# Altium footprint library SS34_DO-214AC.PcbLib: 3 footprints
Each footprint in its own frame and in the unit in brackets; x right, y up, seen from the top. Pads: shape width x height; smd on the part's side, far side on the other; paste and mask are expansions set on the pad; w line width, h text height; cw(c..) or ccw(c..) is an arc to the next point about the centre after c.
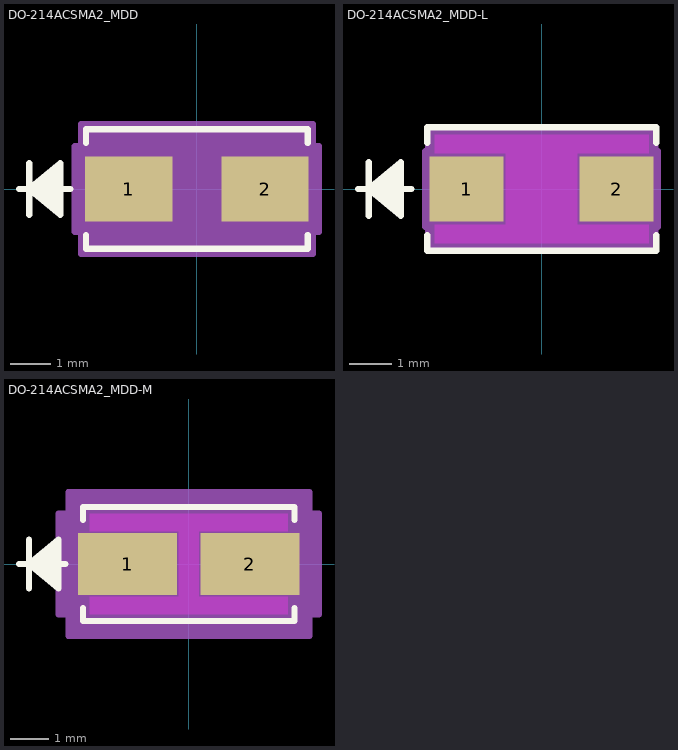
[diagram p0: the footprints below, top view; thin cyan lines are the x and y axes]

## DO-214ACSMA2_MDD [mil]
pads (2):
  rect 84.59x63 smd paste+0 mask+0: 1(-66.11,0) 2(66.11,0)
Top Overlay:
  lines w6: -172.5,0 -122.5,0 ; -162.5,-25 -162.5,25 ; -132.5,-20 -162.5,0 ; -132.5,-15 -162.5,0 ; -132.5,-10 -162.5,0 ; -132.5,-5 -162.5,0 ; -132.5,5 -162.5,0 ; -132.5,10 -162.5,0 ; -132.5,15 -162.5,0 ; -132.5,20 -162.5,0 ; -107.5,-44.6 -107.5,-58 107.5,-58 107.5,-44.6 ; -107.5,44.6 -107.5,58 107.5,58 107.5,44.6 ; -162.5,0 -132.5,25 -132.5,-25 -162.5,0
  text ".Designator" at -137.5,-25 h50
Mechanical 13:
  lines w1: -172.5,0 -122.5,0 ; -162.5,-25 -162.5,25 ; -132.5,-20 -162.5,0 ; -132.5,-15 -162.5,0 ; -132.5,-10 -162.5,0 ; -132.5,-5 -162.5,0 ; -132.5,5 -162.5,0 ; -132.5,10 -162.5,0 ; -132.5,15 -162.5,0 ; -132.5,20 -162.5,0 ; -162.5,0 -132.5,25 -132.5,-25 -162.5,0 ; -102.5,-53 102.5,-53 102.5,53 -102.5,53 -102.5,-53
  text ".Designator" at -137.5,-25 h50
Mechanical 15:
  region: -112.5,-41.5 -118.41,-41.5 -118.41,41.5 -112.5,41.5 -112.5,63 112.5,63 112.5,41.5 118.41,41.5 118.41,-41.5 112.5,-41.5 112.5,-63 -112.5,-63
  lines w6: -118.41,-41.5 -118.41,41.5 -112.5,41.5 -112.5,63 112.5,63 112.5,41.5 118.41,41.5 118.41,-41.5 112.5,-41.5 112.5,-63 -112.5,-63 -112.5,-41.5 -118.41,-41.5
3D body "DO-214ACSMA2_MDD.step": height 89.02, standoff 0, extent -102.52,-52.99 102.52,52.99

## DO-214ACSMA2_MDD-L [mil]
pads (2):
  rect 69.63x61.03 smd paste+0 mask+0: 1(-70.44,0) 2(70.44,0)
Top Layer keep-out:
  region: -33.63,-33.5 -33.63,33.5 33.63,33.5 33.63,-33.5
  region: -100.5,33.5 -100.5,51 100.5,51 100.5,33.5
  region: -100.5,-51 -100.5,-33.5 100.5,-33.5 100.5,-51
Top Overlay:
  lines w6: -172.5,0 -122.5,0 ; -162.5,-25 -162.5,25 ; -132.5,-20 -162.5,0 ; -132.5,-15 -162.5,0 ; -132.5,-10 -162.5,0 ; -132.5,-5 -162.5,0 ; -132.5,5 -162.5,0 ; -132.5,10 -162.5,0 ; -132.5,15 -162.5,0 ; -132.5,20 -162.5,0 ; -107.5,-43.42 -107.5,-58 107.5,-58 107.5,-43.42 ; -107.5,43.42 -107.5,58 107.5,58 107.5,43.42 ; -162.5,0 -132.5,25 -132.5,-25 -162.5,0
  text ".Designator" at -137.5,-25 h50
Keep-Out Layer:
  region: -33.63,-33.5 -33.63,33.5 33.63,33.5 33.63,-33.5
Mechanical 13:
  lines w1: -172.5,0 -122.5,0 ; -162.5,-25 -162.5,25 ; -132.5,-20 -162.5,0 ; -132.5,-15 -162.5,0 ; -132.5,-10 -162.5,0 ; -132.5,-5 -162.5,0 ; -132.5,5 -162.5,0 ; -132.5,10 -162.5,0 ; -132.5,15 -162.5,0 ; -132.5,20 -162.5,0 ; -162.5,0 -132.5,25 -132.5,-25 -162.5,0 ; -102.5,-53 102.5,-53 102.5,53 -102.5,53 -102.5,-53
  text ".Designator" at -137.5,-25 h50
Mechanical 15:
  region: -106.5,-35.5 -109.26,-35.5 -109.26,35.5 -106.5,35.5 -106.5,57 106.5,57 106.5,35.5 109.26,35.5 109.26,-35.5 106.5,-35.5 106.5,-57 -106.5,-57
  lines w6: -109.26,-35.5 -109.26,35.5 -106.5,35.5 -106.5,57 106.5,57 106.5,35.5 109.26,35.5 109.26,-35.5 106.5,-35.5 106.5,-57 -106.5,-57 -106.5,-35.5 -109.26,-35.5
3D body "DO-214ACSMA2_MDD.step": height 89.02, standoff 0, extent -102.52,-52.99 102.52,52.99

## DO-214ACSMA2_MDD-M [mil]
pads (2):
  rect 100.34x63 smd paste+0 mask+0: 1(-62.17,0) 2(62.17,0)
Top Layer keep-out:
  region: -10,-33.5 -10,33.5 10,33.5 10,-33.5
  region: -100.5,33.5 -100.5,51 100.5,51 100.5,33.5
  region: -100.5,-51 -100.5,-33.5 100.5,-33.5 100.5,-51
Top Overlay:
  lines w6: -172.5,0 -125.44,0 ; -162.5,-25 -162.5,25 ; -132.5,-20 -162.5,0 ; -132.5,-15 -162.5,0 ; -132.5,-10 -162.5,0 ; -132.5,-5 -162.5,0 ; -132.5,5 -162.5,0 ; -132.5,10 -162.5,0 ; -132.5,15 -162.5,0 ; -132.5,20 -162.5,0 ; -107.5,-44.6 -107.5,-58 107.5,-58 107.5,-44.6 ; -107.5,44.6 -107.5,58 107.5,58 107.5,44.6 ; -162.5,0 -132.5,25 -132.5,-25 -162.5,0
  text ".Designator" at -137.5,-25 h50
Keep-Out Layer:
  region: -10,-33.5 -10,33.5 10,33.5 10,-33.5
Mechanical 13:
  lines w1: -172.5,0 -122.5,0 ; -162.5,-25 -162.5,25 ; -132.5,-20 -162.5,0 ; -132.5,-15 -162.5,0 ; -132.5,-10 -162.5,0 ; -132.5,-5 -162.5,0 ; -132.5,5 -162.5,0 ; -132.5,10 -162.5,0 ; -132.5,15 -162.5,0 ; -132.5,20 -162.5,0 ; -162.5,0 -132.5,25 -132.5,-25 -162.5,0 ; -102.5,-53 102.5,-53 102.5,53 -102.5,53 -102.5,-53
  text ".Designator" at -137.5,-25 h50
Mechanical 15:
  region: -122.5,-51.5 -132.34,-51.5 -132.34,51.5 -122.5,51.5 -122.5,73 122.5,73 122.5,51.5 132.34,51.5 132.34,-51.5 122.5,-51.5 122.5,-73 -122.5,-73
  lines w6: -132.34,-51.5 -132.34,51.5 -122.5,51.5 -122.5,73 122.5,73 122.5,51.5 132.34,51.5 132.34,-51.5 122.5,-51.5 122.5,-73 -122.5,-73 -122.5,-51.5 -132.34,-51.5
3D body "DO-214ACSMA2_MDD.step": height 89.02, standoff 0, extent -102.52,-52.99 102.52,52.99